# Altium schematic symbol library RB1-105BAG1A.SchLib: 1 symbol
Pins are listed as number, name and electrical type; pins without a type are passive.

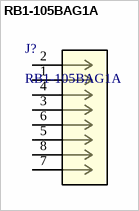
[diagram p0: symbol RB1-105BAG1A]

## RB1-105BAG1A
designator J?
Description; Manufacturer_Name: WIZnet; Copyright: Copyright (C) 2025 Ultra Librarian. All rights reserved.; Manufacturer_Part_Number: RB1-105BAG1A; RefDes: RefDes; Type: Type
footprint CONN8_5BAG1A_WIZ
pins: 1, 2, 3, 4, 5, 6, 7, 8